# Altium schematic symbol library Robert_.SchLib: 177 symbols (part 1 of 6)
Pins are listed as number, name and electrical type; pins without a type are passive.

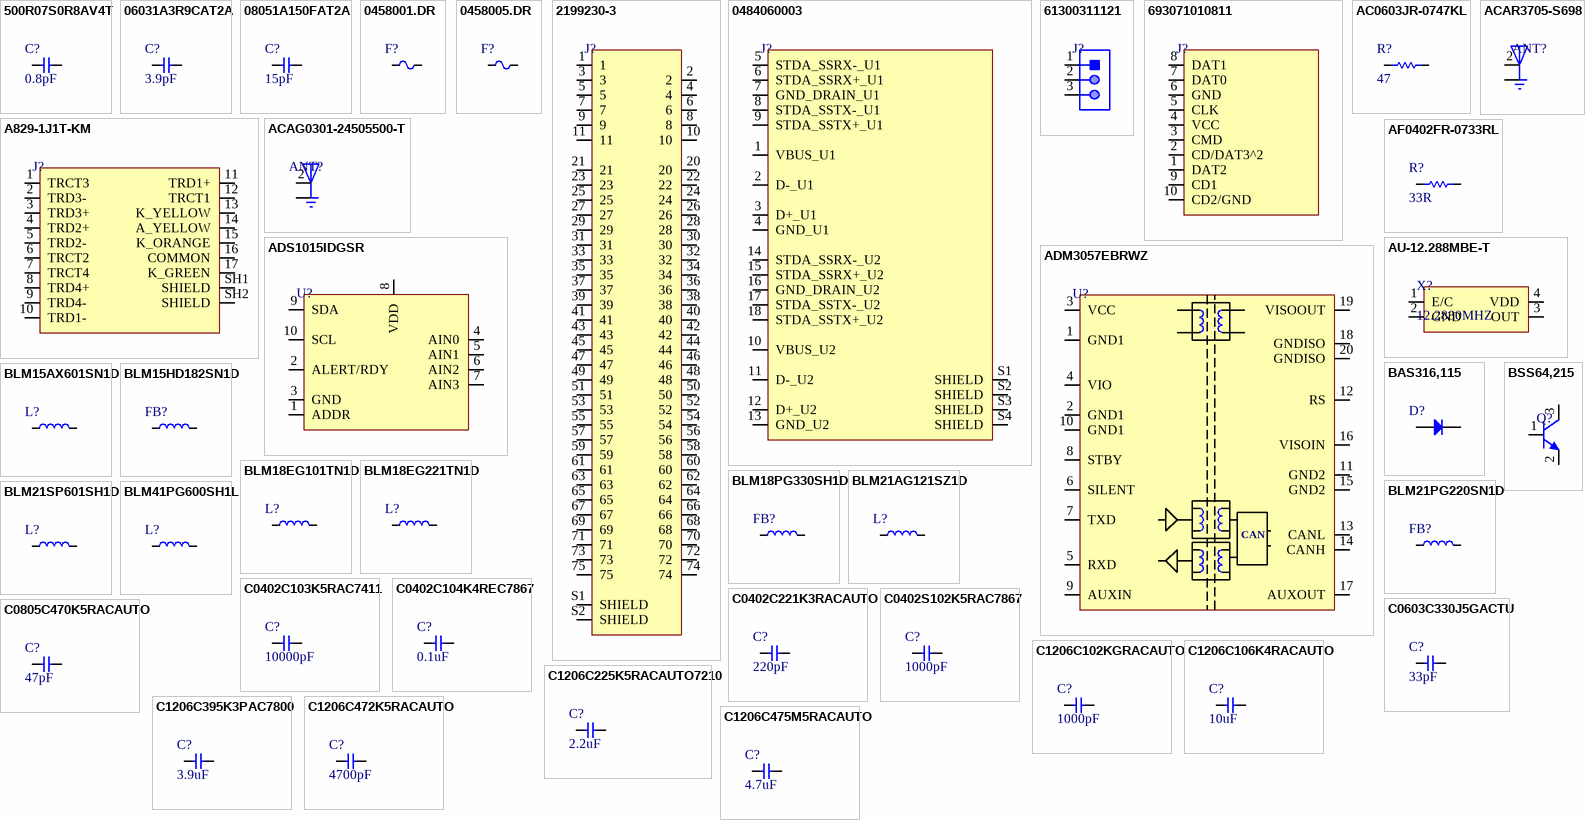
[diagram p0: symbols 500R07S0R8AV4T to C1206C475M5RACAUTO]

## 500R07S0R8AV4T
designator C?, comment 0.8pF
CAP CER 0.8PF 50V C0G/NP0 0402; Manufacturer: Johanson; Manufacturer Part Number: 500R07S0R8AV4T; Item Type: Capacitor; Supplier: Arrow Electronics; Supplier Part Number: 500R07S0R8AV4T; RoHS: Yes; Category: Ceramic Capacitors; Stock: 20000; Pricing: 10000=0.04, 20000=0.0378, 30000=0.0368, 50000=0.0346, 100000=0.0307 (USD); ComponentLink1URL: https://datasheet.ciiva.com/8062/1698397-8062124.pdf?src-supplier=Element14; ComponentLink1Description: https://datasheet.ciiva.com/8062/1698397-8062124.pdf?src-supplier=Element14; ComponentLink2URL: https://datasheet.ciiva.com/46385/1698397-46385194.pdf?src-supplier=Element14; ComponentLink2Description: https://datasheet.ciiva.com/46385/1698397-46385194.pdf?src-supplier=Element14; ComponentLink3URL: https://datasheet.ciiva.com/24039/jti-cat-mlcc-highq-516212-24039375.pdf?src-supplier=Mouser; ComponentLink3Description: https://datasheet.ciiva.com/24039/jti-cat-mlcc-highq-516212-24039375.pdf?src-supplier=Mouser; ComponentLink4URL: https://datasheet.ciiva.com/1461/1318610-1461654.pdf?src-supplier=Element14; ComponentLink4Description: https://datasheet.ciiva.com/1461/1318610-1461654.pdf?src-supplier=Element14
footprint Cap-0402
pins: 1, 2

## 06031A3R9CAT2A
designator C?, comment 3.9pF
CAP CER 3.9PF 100V C0G/NP0 0603; Manufacturer: Kyocera AVX; Manufacturer Part Number: 06031A3R9CAT2A; Item Type: Capacitor; Supplier: Avnet; Supplier Part Number: 06031A3R9CAT2A; RoHS: Yes; Category: Ceramic Capacitors; Stock: 8000; Pricing: 8000=0.0348, 16000=0.034, 24000=0.0332, 40000=0.0324, 80000=0.0316, 400000=0.0308, 800000=0.0304 (USD); ComponentLink1URL: https://datasheet.ciiva.com/26859/getdatasheetpartid-156873-26859834.pdf?src-supplier=Verical; ComponentLink1Description: https://datasheet.ciiva.com/26859/getdatasheetpartid-156873-26859834.pdf?src-supplier=Verical; ComponentLink2URL: https://datasheet.ciiva.com/151/ccog-151266.pdf?src-supplier=Digi-Key; ComponentLink2Description: https://datasheet.ciiva.com/151/ccog-151266.pdf?src-supplier=Digi-Key; ComponentLink3URL: https://datasheet.ciiva.com/151/ccog-151267.pdf?src-supplier=Digi-Key; ComponentLink3Description: https://datasheet.ciiva.com/151/ccog-151267.pdf?src-supplier=Digi-Key; ComponentLink4URL: https://datasheet.ciiva.com/151/ccog-151268.pdf?src-supplier=Digi-Key; ComponentLink4Description: https://datasheet.ciiva.com/151/ccog-151268.pdf?src-supplier=Digi-Key
footprint Cap-0603
pins: 1, 2

## 08051A150FAT2A
designator C?, comment 15pF
CAP CER 15PF 100V NP0 0805; Manufacturer: Kyocera AVX; Manufacturer Part Number: 08051A150FAT2A; Item Type: Capacitor; Supplier: Avnet; Supplier Part Number: 96Y8394; RoHS: Yes; Category: Ceramic Capacitors; Stock: 3533; Pricing: 1=0.551, 25=0.294, 50=0.242 (USD); ComponentLink1URL: https://datasheet.ciiva.com/6265/ccog-6265518.pdf?src-supplier=Digi-Key; ComponentLink1Description: https://datasheet.ciiva.com/6265/ccog-6265518.pdf?src-supplier=Digi-Key; ComponentLink2URL: https://datasheet.ciiva.com/5414/ccog-5414908.pdf?src-supplier=Mouser; ComponentLink2Description: https://datasheet.ciiva.com/5414/ccog-5414908.pdf?src-supplier=Mouser
footprint Cap-0805 (SMD 0805)
pins: 1, 2

## 0458001.DR
designator F?
FUSE BRD MNT 1A 48VAC 75VDC 1206; Manufacturer: Littelfuse; Manufacturer Part Number: 0458001.DR; Supplier: Rs; Supplier Part Number: 1740295; RoHS: Yes; Category: Fuses; Stock: 140; Pricing: 1=0.76003, 10=0.73892, 25=0.71895, 50=0.70003 (GBP); ComponentLink1URL: https://datasheet.ciiva.com/299/littelfuse-fuse-458-series-299789.pdf?src-supplier=Digi-Key; ComponentLink1Description: https://datasheet.ciiva.com/299/littelfuse-fuse-458-series-299789.pdf?src-supplier=Digi-Key; ComponentLink2URL: https://datasheet.ciiva.com/299/littelfuse-fuse-458-series-299790.pdf?src-supplier=Digi-Key; ComponentLink2Description: https://datasheet.ciiva.com/299/littelfuse-fuse-458-series-299790.pdf?src-supplier=Digi-Key; ComponentLink3URL: https://datasheet.ciiva.com/299/littelfuse-fuse-458-series-299791.pdf?src-supplier=Digi-Key; ComponentLink3Description: https://datasheet.ciiva.com/299/littelfuse-fuse-458-series-299791.pdf?src-supplier=Digi-Key; ComponentLink4URL: https://datasheet.ciiva.com/1730/337915-1730543.pdf?src-supplier=Newark; ComponentLink4Description: https://datasheet.ciiva.com/1730/337915-1730543.pdf?src-supplier=Newark; ComponentLink5URL: https://datasheet.ciiva.com/7991/337915-7991902.pdf?src-supplier=Element14; ComponentLink5Description: https://datasheet.ciiva.com/7991/337915-7991902.pdf?src-supplier=Element14; ComponentLink6URL: https://datasheet.ciiva.com/1549/337915-1549634.pdf?src-supplier=Element14; ComponentLink6Description: https://datasheet.ciiva.com/1549/337915-1549634.pdf?src-supplier=Element14; Item Type: Fuse
footprint 0458001.DR
pins: 1, 2

## 0458005.DR
designator F?
Fuse Chip Fast Acting 5A 75V SMD Solder Pad 1206 Ceramic T/R Automotive cULus; Manufacturer: Littelfuse; Manufacturer Part Number: 0458005.DR; Supplier: Rs; Supplier Part Number: 1740294; RoHS: Yes; Category: Fuses; Stock: 1005; Pricing: 1=0.62077, 10=0.73892, 25=0.71895, 50=0.70003 (GBP); ComponentLink1URL: https://datasheet.ciiva.com/1730/337915-1730547.pdf?src-supplier=Newark; ComponentLink1Description: https://datasheet.ciiva.com/1730/337915-1730547.pdf?src-supplier=Newark; ComponentLink2URL: https://datasheet.ciiva.com/7991/337915-7991910.pdf?src-supplier=Element14; ComponentLink2Description: https://datasheet.ciiva.com/7991/337915-7991910.pdf?src-supplier=Element14; ComponentLink3URL: https://datasheet.ciiva.com/299/littelfuse-fuse-458-series-299786.pdf?src-supplier=Digi-Key; ComponentLink3Description: https://datasheet.ciiva.com/299/littelfuse-fuse-458-series-299786.pdf?src-supplier=Digi-Key; ComponentLink4URL: https://datasheet.ciiva.com/299/littelfuse-fuse-458-series-299787.pdf?src-supplier=Digi-Key; ComponentLink4Description: https://datasheet.ciiva.com/299/littelfuse-fuse-458-series-299787.pdf?src-supplier=Digi-Key; ComponentLink5URL: https://datasheet.ciiva.com/299/littelfuse-fuse-458-series-299788.pdf?src-supplier=Digi-Key; ComponentLink5Description: https://datasheet.ciiva.com/299/littelfuse-fuse-458-series-299788.pdf?src-supplier=Digi-Key
footprint 0458005.DR
pins: 1, 2

## 2199230-3
designator J?
M2 KEY B Connector .5PITCH 4.2H KEY B EMBOSS NGFF MINICARD; Manufacturer: TE Connectivity; Manufacturer Part Number: 2199230-3; Gender: Female; Number of Positions: 67; PCB Mounting Orientation: Right Angle; Contact Current Rating: 500mA; Voltage Rating: 50V; Insulation Resistance: 500MR; Pitch: 0.5mm; Row Spacing: 7.55mm; Supplier: Rs; Supplier Part Number: 2175444; RoHS: Yes; Category: Card Edge Connectors; Stock: 5895; Pricing: 1000=0.84 (GBP); Mounting Technology: Surface Mount; Contact Plating: Gold,Matte; Contact Material: Copper Alloy; Color: Black; Housing Color: Black; Insulation Material: Thermoplastic; Housing Material: Thermoplastic; Min Operating Temperature: -40°C; Max Operating Temperature: 80°C; Number of Rows: 2; Packaging: Tape and Reel; Package Quantity: 1000; Termination: Solder; Series: -; Contact Type: -; Current Rating: 500mA; Number of Contacts: 67; Orientation: Right Angle; Max Voltage Rating (AC): 50V; Length: 0.862inch; Width: 8.7mm; Height: 0.165inch; Radiation Hardening: No; ELV: Compliant; RoHS Compliant: Yes; Reach SVHC Compliant: Unknown
footprint 2199230-3
pins: 1, 2, 3, 4, 5, 6, 7, 8, 9, 10, 11, 20, 21, 22, 23, 24, 25, 26, 27, 28, 29, 30, 31, 32, 33, 34, 35, 36, 37, 38, 39, 40, 41, 42, 43, 44, 45, 46, 47, 48, 49, 50, 51, 52, 53, 54, 55, 56, 57, 58, 59, 60, 61, 62, 63, 64, 65, 66, 67, 68, 69, 70, 71, 72, 73, 74, 75, S1 SHIELD, S2 SHIELD

## 0484060003
designator J?
CONN RCPT USB3.0 TYPEA STACK R/A; Manufacturer: Molex; Manufacturer Part Number: 0484060003; Supplier: Mouser; Supplier Part Number: 538-48406-0003; RoHS: Yes; Stock: 6983; Pricing: 1=2.63, 10=2.32, 50=2.32, 100=1.84, 1000=1.79, 10000=1.36 (USD); ComponentLink1URL: https://datasheet.octopart.com/48406-0003-Molex-datasheet-101583044.pdf?src-supplier=Farnell; ComponentLink1Description: https://datasheet.octopart.com/48406-0003-Molex-datasheet-101583044.pdf?src-supplier=Farnell; ComponentLink2URL: https://www.molex.com/pdm_docs/sd/484060003_sd.pdf?src-supplier=Digi-Key; ComponentLink2Description: https://www.molex.com/pdm_docs/sd/484060003_sd.pdf?src-supplier=Digi-Key; ComponentLink3URL: https://datasheet.octopart.com/48406-0003-Molex-datasheet-33003502.pdf?src-supplier=Newark; ComponentLink3Description: https://datasheet.octopart.com/48406-0003-Molex-datasheet-33003502.pdf?src-supplier=Newark; ComponentLink4URL: https://datasheet.octopart.com/48406-0003-Molex-datasheet-21137617.pdf?src-supplier=Sager+Electronics; ComponentLink4Description: https://datasheet.octopart.com/48406-0003-Molex-datasheet-21137617.pdf?src-supplier=Sager+Electronics; ComponentLink5URL: https://datasheet.octopart.com/484060003-Molex-datasheet-168216735.pdf?src-supplier=TME; ComponentLink5Description: https://datasheet.octopart.com/484060003-Molex-datasheet-168216735.pdf?src-supplier=TME; ComponentLink6URL: https://datasheet.octopart.com/48406-0003-Molex-datasheet-154752298.pdf?src-supplier=Master+Electronics; ComponentLink6Description: https://datasheet.octopart.com/48406-0003-Molex-datasheet-154752298.pdf?src-supplier=Master+Electronics
footprint 0484060003
pins: 1 VBUS_U1, 2 D-_U1, 3 D+_U1, 4 GND_U1, 5 STDA_SSRX-_U1, 6 STDA_SSRX+_U1, 7 GND_DRAIN_U1, 8 STDA_SSTX-_U1, 9 STDA_SSTX+_U1, 10 VBUS_U2, 11 D-_U2, 12 D+_U2, 13 GND_U2, 14 STDA_SSRX-_U2, 15 STDA_SSRX+_U2, 16 GND_DRAIN_U2, 17 STDA_SSTX-_U2, 18 STDA_SSTX+_U2, S1 SHIELD, S2 SHIELD, S3 SHIELD, S4 SHIELD

## 61300311121
designator J?
CONN HEADER VERT 3POS 2.54MM; Manufacturer: Wurth Electronics; Manufacturer Part Number: 61300311121; Number of Positions: 3; Gender: Male; Connector Type: Male Pin; Pitch: 0.1inch; Item Type: Male Header; Supplier 1: Digi-Key; Stock 1: 81286; Pricing 1: 1=0.13, 10=0.106, 25=0.088, 50=0.074, 100=0.067, 1000=0.061 (USD); Mount: Through Hole; Contact Plating: Gold; Contact Material: Copper; Color: Black; Number of Rows: 1; Packaging: Bulk; Termination: Solder; Number of Contacts: 3; Contact Mating Length: 0.236inch; REACH SVHC: Unknown; Lead Free: Lead Free; ComponentLink1URL: http://www.farnell.com/cad/1737268.pdf?src-supplier=Element14; ComponentLink1Description: http://www.farnell.com/cad/1737268.pdf?src-supplier=Element14; ComponentLink2URL: https://katalog.we-online.de/em/datasheet/6130xx11121.pdf?src-supplier=Digi-Key; ComponentLink2Description: https://katalog.we-online.de/em/datasheet/6130xx11121.pdf?src-supplier=Digi-Key; Supplier Part Number 1: 732-5316-ND
footprint HDR1X3_ (Connector; Header; 3 Position)
pins: 1, 2, 3

## 693071010811
designator J?
CONN MICRO SD CARD PUSH-PUSH R/A; Manufacturer: Wurth Electronics; Manufacturer Part Number: 693071010811; Number of Contacts: 8; Supplier: Rs; Supplier Part Number: 7636808P; RoHS: Yes; Category: Memory Connectors; Stock: 1582; Pricing: 15=2.41, 50=2.12, 100=2.02, 250=1.74 (GBP); Mounting Technology: Surface Mount; Contact Material: Copper Alloy,Copper,Gold; Contact Plating: Gold; Min Operating Temperature: -25°C; Max Operating Temperature: 85°C; Package Quantity: 1; Packaging: Cut Tape; Series: -; Length: 14mm; Width: 15.2mm; Height: 1.98mm; RoHS Compliant: Yes; Reach SVHC Compliant: Unknown; Lead Free: Lead Free; ComponentLink1URL: https://datasheet.ciiva.com/6935/693071010811-6935152.pdf?src-supplier=Digi-Key; ComponentLink1Description: https://datasheet.ciiva.com/6935/693071010811-6935152.pdf?src-supplier=Digi-Key; ComponentLink2URL: https://datasheet.ciiva.com/25605/0900766b81113f2e-25605369.pdf?src-supplier=Rs; ComponentLink2Description: https://datasheet.ciiva.com/25605/0900766b81113f2e-25605369.pdf?src-supplier=Rs; ComponentLink3URL: https://datasheet.ciiva.com/1104/1759178-1104796.pdf?src-supplier=Element14; ComponentLink3Description: https://datasheet.ciiva.com/1104/1759178-1104796.pdf?src-supplier=Element14; ComponentLink4URL: https://datasheet.ciiva.com/6935/693071010811-6935146.pdf?src-supplier=Digi-Key; ComponentLink4Description: https://datasheet.ciiva.com/6935/693071010811-6935146.pdf?src-supplier=Digi-Key
footprint 693071010811
pins: 1 DAT2, 2 CD/DAT3^2, 3 CMD, 4 VCC, 5 CLK, 6 GND, 7 DAT0, 8 DAT1, 9 CD1, 10 CD2/GND

## A829-1J1T-KM
designator J?
CONN JACK 1PORT 1000 BASE-TX PCB; Manufacturer: Bel; Manufacturer Part Number: A829-1J1T-KM; Supplier: Mouser; Supplier Part Number: 530-A829-1J1T-KM; RoHS: Yes; Category: Modular / Ethernet Connectors; Stock: 1152; Pricing: 1=7.48, 10=6.77, 50=6.4, 100=6.4, 1000=4.99, 10000=4.99 (USD); ComponentLink1URL: https://belfuse.com/resources/drawings/magneticsolutions/dr-mag-a829-1j1t-km.pdf?src-supplier=Digi-Key; ComponentLink1Description: https://belfuse.com/resources/drawings/magneticsolutions/dr-mag-a829-1j1t-km.pdf?src-supplier=Digi-Key; ComponentLink2URL: https://datasheet.octopart.com/A829-1J1T-KM-Bel-Fuse-datasheet-154547170.pdf?src-supplier=Electro+Sonic; ComponentLink2Description: https://datasheet.octopart.com/A829-1J1T-KM-Bel-Fuse-datasheet-154547170.pdf?src-supplier=Electro+Sonic
footprint A829-1J1T-KM
pins: 1 TRCT3, 2 TRD3-, 3 TRD3+, 4 TRD2+, 5 TRD2-, 6 TRCT2, 7 TRCT4, 8 TRD4+, 9 TRD4-, 10 TRD1-, 11 TRD1+, 12 TRCT1, 13 K_YELLOW, 14 A_YELLOW, 15 K_ORANGE, 16 COMMON, 17 K_GREEN, SH1 SHIELD, SH2 SHIELD

## AC0603JR-0747KL
designator R?, comment 47
RES SMD 47K OHM 5% 1/10W 0603; Manufacturer: Yageo; Manufacturer Part Number: AC0603JR-0747KL; Power Rating: 100mW; Value: 47kR; Voltage Rating: 50V; Temperature Coefficient: 100ppm/°C; Supplier: Future Electronics; Supplier Part Number: 1055988; RoHS: Yes; Category: Chip SMD Resistors; Stock: 65000; Pricing: 5000=0.0016, 75000=0.0015, 200000=0.0015, 750000=0.0014, 2000000=0.0013 (USD); Case/Package: 0603; Case Code (Imperial): 0603; Case Code (Metric): 1608; Min Operating Temperature: -55°C; Max Operating Temperature: 155°C; Packaging: Tape and Reel; Tolerance: 5%; Number of Terminations: 2; Termination: SMD/SMT; Max Power Dissipation: 100mW; Features: Moisture Resistant,Automotive AEC-Q200; Series: AC; Length: 1.6mm; Width: 0.8mm; Height: 0.45mm; Ratings: AEC-Q200; RoHS Compliant: Yes; ComponentLink1URL: http://www.mouser.com/ds/2/447/yageodocoutput-1111992.pdf?src-supplier=Mouser; ComponentLink1Description: http://www.mouser.com/ds/2/447/yageodocoutput-1111992.pdf?src-supplier=Mouser; ComponentLink2URL: https://datasheet.octopart.com/AC0603JR-0747KL-Yageo-datasheet-166720450.pdf?src-supplier=Future+Electronics; ComponentLink2Description: https://datasheet.octopart.com/AC0603JR-0747KL-Yageo-datasheet-166720450.pdf?src-supplier=Future+Electronics
footprint Res-0603
pins: 1, 2

## ACAG0301-24505500-T
designator ANT?
RF ANT 2.4GHZ/5.5GHZ CHIP SLD; Manufacturer: Abracon; Manufacturer Part Number: ACAG0301-24505500-T; Supplier: Future Electronics; Supplier Part Number: 4120257; RoHS: Yes; Category: RF Antennas; Stock: 10; Pricing: 1=1.17, 15=1.05, 75=0.985, 300=0.925, 1500=0.86 (USD); ComponentLink1URL: https://abracon.com/datasheets/ACAG0301-24505500-T.pdf?src-supplier=Digi-Key; ComponentLink1Description: https://abracon.com/datasheets/ACAG0301-24505500-T.pdf?src-supplier=Digi-Key; ComponentLink2URL: https://datasheet.octopart.com/ACAG0301-24505500-T-Abracon-datasheet-137316205.pdf?src-supplier=Sager+Electronics; ComponentLink2Description: https://datasheet.octopart.com/ACAG0301-24505500-T-Abracon-datasheet-137316205.pdf?src-supplier=Sager+Electronics
footprint ACAG0301-24505500-T
pins: 1 GND (power), 2 INPUT, 3 GND (power)

## ACAR3705-S698
designator ANT?
Antenna Chip -1.13dB Gain 960MHz/2170MHz/2700MHz 5-Pin Chip T/R; Manufacturer: Abracon; Manufacturer Part Number: ACAR3705-S698; Number of Bands: 3; Return Loss: -13.87dB; Supplier: Rs; Supplier Part Number: 2505128P; RoHS: Yes; Category: RF Antennas; Stock: 1350; Pricing: 50=3.185, 100=2.88, 250=2.45, 500=2.35 (GBP); Mounting Technology: Surface Mount; Packaging: Tape and Reel; Termination: Solder; ComponentLink1URL: https://abracon.com/datasheets/ACAR3705-S698.pdf?src-supplier=Digi-Key; ComponentLink1Description: https://abracon.com/datasheets/ACAR3705-S698.pdf?src-supplier=Digi-Key
footprint ACAR3705-S698
pins: 1 GND (power), 2 INPUT, 3 GND (power)

## ADM3057EBRWZ
designator U?
IC TXRX/ISO 1/1 20SOIC; Manufacturer: Analog Devices; Manufacturer Part Number: ADM3057EBRWZ; Supplier: Mouser; Supplier Part Number: 584-ADM3057EBRWZ; RoHS: Yes; Category: Interface ICs; Stock: 9176; Pricing: 1=13.72, 10=12.62, 50=12.09, 100=12.09, 1000=9.47, 10000=9.47 (USD); Series: *; RoHS Compliant: Yes; ComponentLink1URL: https://www.analog.com/media/en/technical-documentation/data-sheets/ADM3055E-3057E.pdf?src-supplier=Digi-Key; ComponentLink1Description: https://www.analog.com/media/en/technical-documentation/data-sheets/ADM3055E-3057E.pdf?src-supplier=Digi-Key
footprint 20-SOIC
pins: 1 GND1, 2 GND1, 3 VCC, 4 VIO, 5 RXD, 6 SILENT, 7 TXD, 8 STBY, 9 AUXIN, 10 GND1, 11 GND2, 12 RS, 13 CANL, 14 CANH, 15 GND2, 16 VISOIN, 17 AUXOUT, 18 GNDISO, 19 VISOOUT, 20 GNDISO
text: CAN

## ADS1015IDGSR
designator U?
IC ADC 12BIT SIGMA-DELTA 10VSSOP; Manufacturer: Texas Instruments; Manufacturer Part Number: ADS1015IDGSR; Operating Supply Voltage: 3.3V; Min Supply Voltage: 2V; Max Supply Voltage: 5.5V; Interface: I2C; Number of Converters: 1; Resolution: 12b; Number of Bits: 12; Sampling Rate: 3.3KS/s; Polarity: Bipolar; Integral Nonlinearity (INL): 0.5LSB; Supply Type: Single; Number of Inputs: 4; Power Dissipation: 900uW; Supplier 1: Digi-Key; RoHS: Yes; Category: Analog to Digital Converters (ADCs); Pricing 1: 1=3.09000, 10=2.77500, 25=2.62360, 100=2.27370, 250=2.15712, 500=1.93556, 1000=1.65000 (USD); Case/Package: VSSOP; Number of Pins: 10; Contact Plating: Gold; Min Operating Temperature: -40°C; Max Operating Temperature: 125°C; Packaging: Tape and Reel; Package Quantity: 2500; Number of A/D Converters: 1; Number of Elements: 1; Conversion Rate: 3.3KS/s; Max Supply Voltage (DC): 5.5V; Min Supply Voltage (DC): 2V; Series: -; Radiation Hardening: No; Reach SVHC Compliant: Yes; Lead Free: Lead Free; RoHS Compliant: Yes; ComponentLink1URL: https://datasheet.ciiva.com/14260/sbas473c-14260076.pdf?src-supplier=Avnet; ComponentLink1Description: https://datasheet.ciiva.com/14260/sbas473c-14260076.pdf?src-supplier=Avnet; ComponentLink2URL: https://datasheet.ciiva.com/6662/ads1013-6662716.pdf?src-supplier=Digi-Key; ComponentLink2Description: https://datasheet.ciiva.com/6662/ads1013-6662716.pdf?src-supplier=Digi-Key; Supplier Part Number 1: 296-41185-1-ND; LCSC Part Number: C193969; Item Type: IC
footprint 10-VSSOP
pins: 1 ADDR, 2 ALERT/RDY, 3 GND, 4 AIN0, 5 AIN1, 6 AIN2, 7 AIN3, 8 VDD, 9 SDA, 10 SCL

## AF0402FR-0733RL
designator R?, comment 33R
RES SMD 33 OHM 1% 1/16W 0402; Manufacturer: Yageo; Manufacturer Part Number: AF0402FR-0733RL; Voltage Rating: 50V; Supplier: Future Electronics; Supplier Part Number: 2101591; RoHS: Yes; Category: Chip SMD Resistors; Stock: 20000; Pricing: 10000=0.0024, 50000=0.0022, 200000=0.0021, 500000=0.002, 1250000=0.0019 (USD); ComponentLink1URL: http://www.yageo.com/documents/recent/PYu-AF_51_RoHS_L_5.pdf?src-supplier=Digi-Key; ComponentLink1Description: http://www.yageo.com/documents/recent/PYu-AF_51_RoHS_L_5.pdf?src-supplier=Digi-Key; ComponentLink2URL: https://datasheet.octopart.com/AF0402FR-0733RL-Yageo-datasheet-164730775.pdf?src-supplier=Future+Electronics; ComponentLink2Description: https://datasheet.octopart.com/AF0402FR-0733RL-Yageo-datasheet-164730775.pdf?src-supplier=Future+Electronics
footprint Res-0402
pins: 1, 2

## AU-12.288MBE-T
designator X?, comment 12.2880MHZ
XTAL OSC XO 12.2880MHZ CMOS SMD; Manufacturer: TXC; Manufacturer Part Number: AU-12.288MBE-T; Supplier: Digi-Key; Supplier Part Number: 887-1638-1-ND; RoHS: Yes; Category: Oscillators; Stock: 11857; Pricing: 1=2.17, 10=2.121, 50=2.02, 100=1.7675, 500=1.717, 1000=1.4645 (USD); ComponentLink1URL: https://datasheet.ciiva.com/6724/au-6724587.pdf?src-supplier=Digi-Key; ComponentLink1Description: https://datasheet.ciiva.com/6724/au-6724587.pdf?src-supplier=Digi-Key; ComponentLink2URL: https://datasheet.ciiva.com/6724/au-6724589.pdf?src-supplier=Digi-Key; ComponentLink2Description: https://datasheet.ciiva.com/6724/au-6724589.pdf?src-supplier=Digi-Key; ComponentLink3URL: https://datasheet.ciiva.com/6724/au-6724590.pdf?src-supplier=Digi-Key; ComponentLink3Description: https://datasheet.ciiva.com/6724/au-6724590.pdf?src-supplier=Digi-Key
footprint AU-12.288MBE-T
pins: 1 E/C, 2 GND, 3 OUT, 4 VDD

## BAS316,115
designator D?
Rectifier Diode Switching 100V 0.25A 4ns Automotive 2-Pin SOD-323 T/R; Manufacturer: Nexperia; Manufacturer Part Number: BAS316,115; Forward Current: 250mA; Max Forward Surge Current (Ifsm): 500mA; Value: 1.5pF; Max Reverse Current: 500nA; Supplier: Rs; Supplier Part Number: 1821844P; RoHS: Yes; Category: Rectifier Diodes; Stock: 258600; Pricing: 600=0.062, 1200=0.039, 1800=0.037, 2400=0.035 (GBP); Pins: 2NUMBER; Max Operating Temperature: 150°C; Max Repetitive Reverse Voltage (Vrrm): 100V; Packaging: 10Packaging; Reverse Voltage: 100V; Height: 1.1mm; RoHS Compliant: Yes; ComponentLink1URL: http://www.farnell.com/datasheets/1856332.pdf?src-supplier=Farnell; ComponentLink1Description: http://www.farnell.com/datasheets/1856332.pdf?src-supplier=Farnell; ComponentLink2URL: https://assets.nexperia.com/documents/data-sheet/BAS16_SER.pdf?src-supplier=Digi-Key; ComponentLink2Description: https://assets.nexperia.com/documents/data-sheet/BAS16_SER.pdf?src-supplier=Digi-Key; ComponentLink3URL: https://datasheet.octopart.com/BAS316%2C115-Nexperia-datasheet-77871323.pdf?src-supplier=Future+Electronics; ComponentLink3Description: https://datasheet.octopart.com/BAS316%2C115-Nexperia-datasheet-77871323.pdf?src-supplier=Future+Electronics; ComponentLink4URL: https://datasheet.octopart.com/BAS316%2C115-Nexperia-datasheet-32749520.pdf?src-supplier=Element14; ComponentLink4Description: https://datasheet.octopart.com/BAS316%2C115-Nexperia-datasheet-32749520.pdf?src-supplier=Element14; ComponentLink5URL: http://www.farnell.com/datasheets/1856332.pdf?src-supplier=Newark; ComponentLink5Description: http://www.farnell.com/datasheets/1856332.pdf?src-supplier=Newark; ComponentLink6URL: https://datasheet.octopart.com/BAS316%2C115-NXP-datasheet-5319124.pdf?src-supplier=TME; ComponentLink6Description: https://datasheet.octopart.com/BAS316%2C115-NXP-datasheet-5319124.pdf?src-supplier=TME
footprint SOD-323
pins: 1 K, 2 A

## BLM15AX601SN1D
designator L?
FERRITE BEAD 600 OHM 0402 1LN; Manufacturer: Murata; Manufacturer Part Number: BLM15AX601SN1D; Material: Steel,Ferrite; Tolerance: 25%; Impedance: 600R; Current Rating: 500mA; Number of Lines: 1; DC Resistance (DCR): 340mR; Test Frequency: 100MHz; Supplier: Rs; Supplier Part Number: 8390786P; RoHS: Yes; Category: Ferrite Beads and Chips; Stock: 31900; Pricing: 1000=0.019, 2000=0.016, 5000=0.014, 10000=0.013 (GBP); Case/Package: 0402; Pins: 2; Case Code (Metric): 1005; Case Code (Imperial): 0402; Core Material: Ferrite; Min Operating Temperature: -55°C; Max Operating Temperature: 125°C; Package Quantity: 1; Packaging: Tape and Reel; Max Current Rating: 500mA; Termination: SMD/SMT; Max DC Current: 500mA; Number of Circuits: 1; Series: BLM15AX_SN; DC Resistance-Max: 340mR; RMS Current (Irms): 500mA; ESR: 340mR; Length: 1mm; Width: 0.5mm; Height: 0.5mm; Depth: 0.5mm; Reach SVHC Compliant: No; Lead Free: Lead Free; RoHS Compliant: Yes; ComponentLink1URL: https://datasheet.ciiva.com/1012/l0110s0100blm15ax-sn-1012320.pdf?src-supplier=Digi-Key; ComponentLink1Description: https://datasheet.ciiva.com/1012/l0110s0100blm15ax-sn-1012320.pdf?src-supplier=Digi-Key; ComponentLink2URL: https://datasheet.ciiva.com/41425/001171675-da-01-en-chip-drossel0402-600r-420ma-1-0x0-5mm-41425713.pdf?src-supplier=Conrad; ComponentLink2Description: https://datasheet.ciiva.com/41425/001171675-da-01-en-chip-drossel0402-600r-420ma-1-0x0-5mm-41425713.pdf?src-supplier=Conrad; ComponentLink3URL: https://datasheet.ciiva.com/41449/001172169-da-01-en-drossel-0402-600r-1-0x0-5mm-10000st-41449458.pdf?src-supplier=Conrad; ComponentLink3Description: https://datasheet.ciiva.com/41449/001172169-da-01-en-drossel-0402-600r-1-0x0-5mm-10000st-41449458.pdf?src-supplier=Conrad; ComponentLink4URL: https://datasheet.ciiva.com/1012/l0110e-1012321.pdf?src-supplier=Digi-Key; ComponentLink4Description: https://datasheet.ciiva.com/1012/l0110e-1012321.pdf?src-supplier=Digi-Key; ComponentLink5URL: https://datasheet.ciiva.com/1012/l0110e-1012322.pdf?src-supplier=Digi-Key; ComponentLink5Description: https://datasheet.ciiva.com/1012/l0110e-1012322.pdf?src-supplier=Digi-Key; ComponentLink6URL: https://datasheet.ciiva.com/16420/l0110s0100blm15ax-sn-16420781.pdf?src-supplier=Future+Electronics; ComponentLink6Description: https://datasheet.ciiva.com/16420/l0110s0100blm15ax-sn-16420781.pdf?src-supplier=Future+Electronics
footprint IND-0402
pins: 1, 2

## BLM15HD182SN1D
designator FB?
FERRITE BEAD 1.8K OHM 0402 1LN; Manufacturer: Murata; Manufacturer Part Number: BLM15HD182SN1D; Material: Ferrite,Steel; Tolerance: 25%; Impedance: 1.8kR; DC Resistance (DCR): 2.2R; Max DC Current: 200mA; Number of Lines: 1; Test Frequency: 100MHz; Supplier: Rs; Supplier Part Number: 7926224P; RoHS: Yes; Category: Ferrite Beads and Chips; Stock: 3975; Pricing: 500=0.057, 1000=0.05, 2500=0.044, 5000=0.04 (GBP); Case/Package: 0402; Pins: 2; Core Material: Ferrite; Case Code (Metric): 1005; Case Code (Imperial): 0402; Min Operating Temperature: -55°C; Max Operating Temperature: 125°C; Package Quantity: 1; Packaging: Tape and Reel; Current Rating: 200mA; Max Current Rating: 200mA; Termination: SMD/SMT; DC Current: 200mA; Number of Circuits: 1; Series: BLM15H; DC Resistance-Max: 2.2R; Length: 1mm; Width: 0.5mm; Height: 0.5mm; Depth: 0.5mm; Radiation Hardening: No; Reach SVHC Compliant: No; Military Standard: Not; Lead Free: Lead Free; RoHS Compliant: Yes; ComponentLink1URL: https://datasheet.ciiva.com/11799/0900766b811b5866-11799012.pdf?src-supplier=Rs; ComponentLink1Description: https://datasheet.ciiva.com/11799/0900766b811b5866-11799012.pdf?src-supplier=Rs; ComponentLink2URL: https://datasheet.ciiva.com/1466/5168-1466912.pdf?src-supplier=Element14; ComponentLink2Description: https://datasheet.ciiva.com/1466/5168-1466912.pdf?src-supplier=Element14; ComponentLink3URL: https://datasheet.ciiva.com/18089/getdatasheetpartid-153054-18089628.pdf?src-supplier=Verical; ComponentLink3Description: https://datasheet.ciiva.com/18089/getdatasheetpartid-153054-18089628.pdf?src-supplier=Verical; ComponentLink4URL: https://datasheet.ciiva.com/41425/001171684-da-01-en-chip-drossel0402-1800r-200ma-1-0x0-5mm-41425786.pdf?src-supplier=Conrad; ComponentLink4Description: https://datasheet.ciiva.com/41425/001171684-da-01-en-chip-drossel0402-1800r-200ma-1-0x0-5mm-41425786.pdf?src-supplier=Conrad; ComponentLink5URL: https://datasheet.ciiva.com/41449/001172201-da-01-en-drossel-0402-1800r-1-0x0-5mm-10000st-41449489.pdf?src-supplier=Conrad; ComponentLink5Description: https://datasheet.ciiva.com/41449/001172201-da-01-en-drossel-0402-1800r-1-0x0-5mm-10000st-41449489.pdf?src-supplier=Conrad; ComponentLink6URL: https://datasheet.ciiva.com/1466/5168-1466911.pdf?src-supplier=Element14; ComponentLink6Description: https://datasheet.ciiva.com/1466/5168-1466911.pdf?src-supplier=Element14; ComponentLink7URL: https://datasheet.ciiva.com/6211/l0110s0101blm15h-6211478.pdf?src-supplier=Digi-Key; ComponentLink7Description: https://datasheet.ciiva.com/6211/l0110s0101blm15h-6211478.pdf?src-supplier=Digi-Key; ComponentLink8URL: https://datasheet.ciiva.com/29985/l0110s0101blm15h-29985212.pdf?src-supplier=Avnet; ComponentLink8Description: https://datasheet.ciiva.com/29985/l0110s0101blm15h-29985212.pdf?src-supplier=Avnet; ComponentLink9URL: https://datasheet.ciiva.com/16420/l0110s0101blm15h-16420767.pdf?src-supplier=Future+Electronics; ComponentLink9Description: https://datasheet.ciiva.com/16420/l0110s0101blm15h-16420767.pdf?src-supplier=Future+Electronics; ComponentLink10URL: https://datasheet.ciiva.com/3081/l0110s0101blm15h-3081606.pdf?src-supplier=Avnet; ComponentLink10Description: https://datasheet.ciiva.com/3081/l0110s0101blm15h-3081606.pdf?src-supplier=Avnet
footprint IND-0402
pins: 1, 2

## BLM18EG101TN1D
designator L?
FERRITE BEAD 100 OHM 0603 1LN; Manufacturer: Murata; Manufacturer Part Number: BLM18EG101TN1D; Material: Ferrite,Steel; Number of Lines: 1; Tolerance: 25%; Impedance: 100R; Current Rating: 2A; DC Resistance (DCR): 45mR; Test Frequency: 100MHz; Supplier: Rs; Supplier Part Number: 7926246; RoHS: Yes; Category: Ferrite Beads and Chips; Stock: 1750; Pricing: 25=0.093, 500=0.079, 1000=0.07, 2500=0.06, 5000=0.056 (GBP); Case/Package: 0603; Pins: 2; Core Material: Ferrite; Case Code (Metric): 1608; Case Code (Imperial): 0603; Min Operating Temperature: -55°C; Max Operating Temperature: 125°C; Package Quantity: 1; Packaging: Tape and Reel; Max Current Rating: 2A; Max DC Current: 2A; Termination: SMD/SMT; Number of Circuits: 1; Series: BLM18E; DC Resistance-Max: 45mR; Length: 1.6mm; Width: 0.8mm; Height: 0.8mm; Depth: 0.8mm; Reach SVHC Compliant: No; Lead Free: Lead Free; RoHS Compliant: Yes; ComponentLink1URL: https://datasheet.ciiva.com/11795/0900766b811b5866-11795406.pdf?src-supplier=Rs; ComponentLink1Description: https://datasheet.ciiva.com/11795/0900766b811b5866-11795406.pdf?src-supplier=Rs; ComponentLink2URL: https://datasheet.ciiva.com/6211/l0110s0101blm18e-6211712.pdf?src-supplier=Digi-Key; ComponentLink2Description: https://datasheet.ciiva.com/6211/l0110s0101blm18e-6211712.pdf?src-supplier=Digi-Key; ComponentLink3URL: https://datasheet.ciiva.com/41449/001171697-da-01-en-chip-drossel0603-100r-2000ma-1-6x0-8mm-41449375.pdf?src-supplier=Conrad; ComponentLink3Description: https://datasheet.ciiva.com/41449/001171697-da-01-en-chip-drossel0603-100r-2000ma-1-6x0-8mm-41449375.pdf?src-supplier=Conrad; ComponentLink4URL: https://datasheet.ciiva.com/41449/001172263-da-01-en-drossel-0603-100r-1-6x0-8mm-4000st-41449578.pdf?src-supplier=Conrad; ComponentLink4Description: https://datasheet.ciiva.com/41449/001172263-da-01-en-drossel-0603-100r-1-6x0-8mm-4000st-41449578.pdf?src-supplier=Conrad; ComponentLink5URL: https://datasheet.ciiva.com/1467/5169-1467153.pdf?src-supplier=Element14; ComponentLink5Description: https://datasheet.ciiva.com/1467/5169-1467153.pdf?src-supplier=Element14; ComponentLink6URL: https://datasheet.ciiva.com/1467/5169-1467154.pdf?src-supplier=Element14; ComponentLink6Description: https://datasheet.ciiva.com/1467/5169-1467154.pdf?src-supplier=Element14; ComponentLink7URL: https://datasheet.ciiva.com/6211/l0110s0101blm18e-6211711.pdf?src-supplier=Digi-Key; ComponentLink7Description: https://datasheet.ciiva.com/6211/l0110s0101blm18e-6211711.pdf?src-supplier=Digi-Key; ComponentLink8URL: https://datasheet.ciiva.com/6211/l0110s0101blm18e-6211709.pdf?src-supplier=Digi-Key; ComponentLink8Description: https://datasheet.ciiva.com/6211/l0110s0101blm18e-6211709.pdf?src-supplier=Digi-Key; ComponentLink9URL: https://datasheet.ciiva.com/3082/l0110s0101blm18e-3082713.pdf?src-supplier=Avnet; ComponentLink9Description: https://datasheet.ciiva.com/3082/l0110s0101blm18e-3082713.pdf?src-supplier=Avnet; ComponentLink10URL: https://datasheet.ciiva.com/16390/l0110s0101blm18e-16390603.pdf?src-supplier=Future+Electronics; ComponentLink10Description: https://datasheet.ciiva.com/16390/l0110s0101blm18e-16390603.pdf?src-supplier=Future+Electronics
footprint IND-0603 (1608 Metric) (0.063" L x 0.032" W (1.60mm x 0.80mm))
pins: 1, 2

## BLM18EG221TN1D
designator L?
FERRITE BEAD 220 OHM 0603 1LN; Manufacturer: Murata; Manufacturer Part Number: BLM18EG221TN1D; Supplier: Avnet; Supplier Part Number: BLM18EG221TN1D; RoHS: Yes; Category: Ferrite Beads and Chips; Stock: 4000; Pricing: 4000=0.07735, 8000=0.07553, 16000=0.07371, 24000=0.07189, 32000=0.07007 (USD); ComponentLink1URL: https://datasheet.ciiva.com/11795/0900766b811b5866-11795384.pdf?src-supplier=Rs; ComponentLink1Description: https://datasheet.ciiva.com/11795/0900766b811b5866-11795384.pdf?src-supplier=Rs; ComponentLink2URL: https://datasheet.ciiva.com/41449/001172266-da-01-en-drossel-0603-220r-1-6x0-8mm-4000st-41449580.pdf?src-supplier=Conrad; ComponentLink2Description: https://datasheet.ciiva.com/41449/001172266-da-01-en-drossel-0603-220r-1-6x0-8mm-4000st-41449580.pdf?src-supplier=Conrad; ComponentLink3URL: https://datasheet.ciiva.com/1467/5169-1467159.pdf?src-supplier=Element14; ComponentLink3Description: https://datasheet.ciiva.com/1467/5169-1467159.pdf?src-supplier=Element14; ComponentLink4URL: https://datasheet.ciiva.com/1467/5169-1467160.pdf?src-supplier=Element14; ComponentLink4Description: https://datasheet.ciiva.com/1467/5169-1467160.pdf?src-supplier=Element14; ComponentLink5URL: https://datasheet.ciiva.com/8510/l0110s0101blm18e-8510167.pdf?src-supplier=Avnet; ComponentLink5Description: https://datasheet.ciiva.com/8510/l0110s0101blm18e-8510167.pdf?src-supplier=Avnet; ComponentLink6URL: https://datasheet.ciiva.com/16419/l0110s0101blm18e-16419150.pdf?src-supplier=Future+Electronics; ComponentLink6Description: https://datasheet.ciiva.com/16419/l0110s0101blm18e-16419150.pdf?src-supplier=Future+Electronics; ComponentLink7URL: https://datasheet.ciiva.com/6211/l0110s0101blm18e-6211853.pdf?src-supplier=Digi-Key; ComponentLink7Description: https://datasheet.ciiva.com/6211/l0110s0101blm18e-6211853.pdf?src-supplier=Digi-Key
footprint IND-0603 (1608 Metric) (0.063" L x 0.032" W (1.60mm x 0.80mm))
pins: 1, 2

## BLM18PG330SH1D
designator FB?
Ferrite Beads Multi-Layer 33Ohm 25% 100MHz 3A 0.025Ohm DCR 0603 Automotive T/R; Manufacturer: Murata; Manufacturer Part Number: BLM18PG330SH1D; Supplier: Rs; Supplier Part Number: 1048533; RoHS: Yes; Category: Ferrite Beads and Chips; Stock: 7800; Pricing: 200=0.032, 1000=0.028, 3000=0.024, 5000=0.021, 10000=0.019 (GBP); ComponentLink1URL: https://datasheet.ciiva.com/29364/l0132s0193blm18p-29364421.pdf?src-supplier=Digi-Key; ComponentLink1Description: https://datasheet.ciiva.com/29364/l0132s0193blm18p-29364421.pdf?src-supplier=Digi-Key; ComponentLink2URL: https://datasheet.ciiva.com/29364/l0132s0193blm18p-29364423.pdf?src-supplier=Digi-Key; ComponentLink2Description: https://datasheet.ciiva.com/29364/l0132s0193blm18p-29364423.pdf?src-supplier=Digi-Key; ComponentLink3URL: https://datasheet.ciiva.com/29364/l0132s0193blm18p-29364425.pdf?src-supplier=Digi-Key; ComponentLink3Description: https://datasheet.ciiva.com/29364/l0132s0193blm18p-29364425.pdf?src-supplier=Digi-Key
footprint IND-0603 (1608 Metric) (0.063" L x 0.032" W (1.60mm x 0.80mm))
pins: 1, 2

## BLM21AG121SZ1D
designator L?
FERRITE BEAD 120 OHM 0805 1LN; Manufacturer: Murata; Manufacturer Part Number: BLM21AG121SZ1D; Core Material: 228ConductorMaterial; Max Current Rating: 800mA; Number of Lines: 1; Value: 90mR; RMS Current (Irms): 1A; Test Frequency: 100MHz; Tolerance: 25%; Supplier: Digi-Key; Supplier Part Number: 490-BLM21AG121SZ1DCT-ND; RoHS: Yes; Category: Ferrite Beads and Chips; Stock: 3900; Pricing: 1=0.19, 10=0.153, 25=0.1188, 50=0.0984, 100=0.0848, 250=0.06788, 500=0.06108, 1000=0.0509 (USD); Mounting Technology: Surface Mount; Case/Package: 0201; Min Operating Temperature: -55°C; Max Operating Temperature: 125°C; Series: EMIFIL®, BLM21; ESR: 90mR; Height: 1.05mm; Ratings: AEC-Q200; RoHS Compliant: Yes
footprint Ind-0805 (Inductor 0805)
pins: 1, 2

## BLM21PG220SN1D
designator FB?
FERRITE BEAD 22 OHM 0805 1LN; Manufacturer: Murata; Manufacturer Part Number: BLM21PG220SN1D; Supplier: Rs; Supplier Part Number: 7241539P; RoHS: Yes; Category: Ferrite Beads and Chips; Stock: 10325; Pricing: 500=0.043, 1000=0.038, 2500=0.033, 5000=0.03 (GBP); ComponentLink1URL: https://datasheet.ciiva.com/14122/anblm21p-data-e-14122211.pdf?src-supplier=Distrelec; ComponentLink1Description: https://datasheet.ciiva.com/14122/anblm21p-data-e-14122211.pdf?src-supplier=Distrelec; ComponentLink2URL: https://datasheet.ciiva.com/11799/0900766b81275e31-11799177.pdf?src-supplier=Rs; ComponentLink2Description: https://datasheet.ciiva.com/11799/0900766b81275e31-11799177.pdf?src-supplier=Rs; ComponentLink3URL: https://datasheet.ciiva.com/29700/1845312-29700540.pdf?src-supplier=Jameco; ComponentLink3Description: https://datasheet.ciiva.com/29700/1845312-29700540.pdf?src-supplier=Jameco; ComponentLink4URL: https://datasheet.ciiva.com/16291/l0110s0100blm21p-16291622.pdf?src-supplier=Future+Electronics; ComponentLink4Description: https://datasheet.ciiva.com/16291/l0110s0100blm21p-16291622.pdf?src-supplier=Future+Electronics; ComponentLink5URL: https://datasheet.ciiva.com/8021/5160-8021589.pdf?src-supplier=Element14; ComponentLink5Description: https://datasheet.ciiva.com/8021/5160-8021589.pdf?src-supplier=Element14; ComponentLink6URL: https://datasheet.ciiva.com/8021/5160-8021591.pdf?src-supplier=Element14; ComponentLink6Description: https://datasheet.ciiva.com/8021/5160-8021591.pdf?src-supplier=Element14; ComponentLink7URL: https://datasheet.ciiva.com/6211/l0110s0100blm21p-6211741.pdf?src-supplier=Digi-Key; ComponentLink7Description: https://datasheet.ciiva.com/6211/l0110s0100blm21p-6211741.pdf?src-supplier=Digi-Key; ComponentLink8URL: https://datasheet.ciiva.com/3081/l0110s0100blm21p-3081653.pdf?src-supplier=Avnet; ComponentLink8Description: https://datasheet.ciiva.com/3081/l0110s0100blm21p-3081653.pdf?src-supplier=Avnet; ComponentLink9URL: https://datasheet.ciiva.com/41449/001171738-da-01-en-chip-drossel0805-22r0-6000ma-2-0x1-25mm-41449366.pdf?src-supplier=Conrad; ComponentLink9Description: https://datasheet.ciiva.com/41449/001171738-da-01-en-chip-drossel0805-22r0-6000ma-2-0x1-25mm-41449366.pdf?src-supplier=Conrad; LCSC Part Number: C88993; Item Type: Ferrite Bead
footprint Ind-0805 (Inductor 0805)
pins: 1, 2

## BLM21SP601SH1D
designator L?
FERRITE BEAD 600 OHM 0805 1LN; Manufacturer: Murata; Manufacturer Part Number: BLM21SP601SH1D; Supplier: Arrow Electronics; Supplier Part Number: BLM21SP601SH1D; RoHS: Yes; Category: Ferrite Beads and Chips; Stock: 60000; Pricing: 4000=0.0948 (USD); ComponentLink1URL: https://www.murata.com/en-us/api/pdfdownloadapi?cate=luNoiseSupprFilteChipFerriBead&amp;partno=BLM21SP601SH1%23&src-supplier=Digi-Key; ComponentLink1Description: https://www.murata.com/en-us/api/pdfdownloadapi?cate=luNoiseSupprFilteChipFerriBead&amp;partno=BLM21SP601SH1%23&src-supplier=Digi-Key; ComponentLink2URL: https://datasheet.octopart.com/BLM21SP601SH1D-Murata-datasheet-138707483.pdf?src-supplier=Future+Electronics; ComponentLink2Description: https://datasheet.octopart.com/BLM21SP601SH1D-Murata-datasheet-138707483.pdf?src-supplier=Future+Electronics; ComponentLink3URL: https://datasheet.octopart.com/BLM21SP601SH1D-Murata-datasheet-166171483.pdf?src-supplier=TME; ComponentLink3Description: https://datasheet.octopart.com/BLM21SP601SH1D-Murata-datasheet-166171483.pdf?src-supplier=TME
footprint Ind-0805 (Inductor 0805)
pins: 1, 2

## BLM41PG600SH1L
designator L?
FERRITE BEAD 60 OHM 1806 1LN; Manufacturer: Murata; Manufacturer Part Number: BLM41PG600SH1L; Impedance: 60R; Tolerance: 25%; Max Current Rating: 6A; Number of Lines: 1; Test Frequency: 100MHz; Shielding: Unshielded; Supplier: Rs; Supplier Part Number: 1048549; RoHS: Yes; Category: Ferrite Beads and Chips; Stock: 2410; Pricing: 10=0.2, 50=0.169, 100=0.15, 500=0.13, 2000=0.12 (GBP); Mounting Technology: Surface Mount; Case/Package: 1806; Case Code (Metric): 4516; Case Code (Imperial): 1806; Contact Plating: Tin,Matte; Min Operating Temperature: -55°C; Max Operating Temperature: 125°C; Package Quantity: 1; Packaging: Tape and Reel; Max DC Current: 6A; Termination: SMD/SMT; Series: EMIFIL®, BLM41P; Length: 4.5mm; Width: 0.063inch; Height: 0.071inch; Ratings: AEC-Q200; Reach SVHC Compliant: No; Lead Free: Lead Free; RoHS Compliant: Yes; ComponentLink1URL: https://datasheet.ciiva.com/29364/l0132s0193blm41p-29364181.pdf?src-supplier=Digi-Key; ComponentLink1Description: https://datasheet.ciiva.com/29364/l0132s0193blm41p-29364181.pdf?src-supplier=Digi-Key; ComponentLink2URL: https://datasheet.ciiva.com/3067/c31e-3067201.pdf?src-supplier=Avnet; ComponentLink2Description: https://datasheet.ciiva.com/3067/c31e-3067201.pdf?src-supplier=Avnet
footprint IND 1806
pins: 1, 2

## BSS64,215
designator Q?
TRANS NPN 80V 0.1A TO236AB; Manufacturer: Nexperia; Manufacturer Part Number: BSS64,215; Supplier: Future Electronics; Supplier Part Number: 6621338; RoHS: Yes; Category: BJTs; Stock: 3000; Pricing: 3000=0.0487, 9000=0.047, 15000=0.0462, 60000=0.044, 90000=0.0427 (USD); Packaging: 10Packaging; ComponentLink1URL: https://datasheet.octopart.com/BSS64%2C215-Nexperia-datasheet-87581098.pdf?src-supplier=TME; ComponentLink1Description: https://datasheet.octopart.com/BSS64%2C215-Nexperia-datasheet-87581098.pdf?src-supplier=TME
footprint SOT-23 (TRANS NPN 40V 0.6A SOT23)
pins: 1 B, 2 E, 3 C

## C0402C103K5RAC7411
designator C?, comment 10000pF
CAP CER 10000PF 50V X7R 0402; Manufacturer: KEMET; Manufacturer Part Number: C0402C103K5RAC7411; Dielectric Material: Ceramic; Value: 10nF; Tolerance: 10%; Item Type: Capacitor; Supplier: Mouser; Supplier Part Number: 80-C0402C103K5R7411; RoHS: Yes; Category: Ceramic Capacitors; Stock: 440672; Pricing: 1=0.1, 10=0.017, 50=0.017, 100=0.009, 1000=0.005, 10000=0.004 (USD); Mounting Technology: Surface Mount; Case/Package: 0402; Min Operating Temperature: -55°C; Max Operating Temperature: 125°C; Dielectric: X7R; Voltage Rating (DC): 50V; Construction: Flat; Length: 1mm; Height: 0.5mm; Depth: 0.5mm; Radiation Hardening: No; RoHS Compliant: Yes; ComponentLink1URL: http://capacitoredge.kemet.com/capedge2/DataSheet?pn=C0402C103K5RAC7411&src-supplier=Avnet; ComponentLink1Description: http://capacitoredge.kemet.com/capedge2/DataSheet?pn=C0402C103K5RAC7411&src-supplier=Avnet
footprint Cap-0402
pins: 1, 2

## C0402C104K4REC7867
designator C?, comment 0.1uF
Cap Cer 0402 0.1UF 16V X7R 10%; Manufacturer: KEMET; Manufacturer Part Number: C0402C104K4REC7867; Item Type: Capacitor; Supplier: Digi-Key; Supplier Part Number: 399-C0402C104K4REC7867CT-ND; RoHS: No; Category: Ceramic Capacitors; Stock: 10918; Pricing: 1=0.1, 10=0.072, 50=0.0408, 100=0.0338, 500=0.02372, 1000=0.01963, 2500=0.01827, 5000=0.01672 (USD)
footprint Cap-0402
pins: 1, 2

## C0402C221K3RACAUTO
designator C?, comment 220pF
Cap Cer 220PF 25V X7R 0402; Manufacturer: KEMET; Manufacturer Part Number: C0402C221K3RACAUTO; Supplier: Mouser; Supplier Part Number: 80-C0402C221K3RAUTO; RoHS: Yes; Category: Ceramic Capacitors; Stock: 7535; Pricing: 1=0.36, 10=0.251, 50=0.251, 100=0.15, 1000=0.095, 10000=0.077 (USD); RoHS Compliant: Yes
footprint Cap-0402
pins: 1, 2

## C0402S102K5RAC7867
designator C?, comment 1000pF
CAP CER 1000PF 50V X7R 0402; Manufacturer: KEMET; Manufacturer Part Number: C0402S102K5RAC7867; Item Type: Capacitor; Supplier: Mouser; Supplier Part Number: 80-C0402S102K5R7867; RoHS: Yes; Stock: 17394; Pricing: 1=0.43, 10=0.208, 50=0.208, 100=0.156, 1000=0.113, 10000=0.092 (USD); RoHS Compliant: Yes; ComponentLink1URL: https://api.kemet.com/component-edge/download/datasheet/C0402S102K5RAC7867.pdf?src-supplier=Digi-Key; ComponentLink1Description: https://api.kemet.com/component-edge/download/datasheet/C0402S102K5RAC7867.pdf?src-supplier=Digi-Key
footprint Cap-0402
pins: 1, 2

## C0603C330J5GACTU
designator C?, comment 33pF
Multilayer Ceramic Capacitor, 33 pF, 50 V, ± 5%, C0G (NP0), 0603 [1608 Metric]; Manufacturer: KEMET; Manufacturer Part Number: C0603C330J5GACTU; Material: 4241ConductorMaterial; Voltage Rating (DC): 50V; Temperature Coefficient: 30ppm/°C; Dissipation Factor: 0.1%; Supplier: Mouser; Supplier Part Number: 80-C0603C330J5G; RoHS: Yes; Category: Ceramic Capacitors; Stock: 156407; Pricing: 1=0.14, 10=0.055, 50=0.055, 100=0.032, 1000=0.027, 10000=0.019 (USD); Mounting Technology: Surface Mount,PCB; Case/Package: 0603; Pins: 2; Case Code (Metric): 1608; Case Code (Imperial): 0603; Min Operating Temperature: -55°C; Max Operating Temperature: 125°C; Value: 33pF; Tolerance: 5%; Packaging: Tape and Reel; Dielectric: C0G; Package Quantity: 4000; Voltage Rating: 50V; Termination: SMD/SMT; Voltage: 50V; Series: SMD Comm C0G; Construction: Flat; Length: 1.6mm; Width: 0.8mm; Height: 0.8mm; Lead Pitch: 0.7mm; Depth: 0.8mm; Radiation Hardening: No; Reach SVHC Compliant: No; Lead Free: 5697LeadFree; RoHS Compliant: Yes; ComponentLink1URL: https://datasheet.ciiva.com/6177/1732690-6177173.pdf?src-supplier=Farnell; ComponentLink1Description: https://datasheet.ciiva.com/6177/1732690-6177173.pdf?src-supplier=Farnell; ComponentLink2URL: https://datasheet.ciiva.com/7823/1732690-7823738.pdf?src-supplier=Element14; ComponentLink2Description: https://datasheet.ciiva.com/7823/1732690-7823738.pdf?src-supplier=Element14; ComponentLink3URL: https://datasheet.ciiva.com/7824/kem-c1003-c0g-smd-7824030.pdf?src-supplier=Element14; ComponentLink3Description: https://datasheet.ciiva.com/7824/kem-c1003-c0g-smd-7824030.pdf?src-supplier=Element14; ComponentLink4URL: https://datasheet.ciiva.com/28668/1789732-28668661.pdf?src-supplier=Element14; ComponentLink4Description: https://datasheet.ciiva.com/28668/1789732-28668661.pdf?src-supplier=Element14; Item Type: Capacitor
footprint Cap-0603
pins: 1, 2

## C0805C470K5RACAUTO
designator C?, comment 47pF
Cap Cer 47PF 50V X7R 0805; Manufacturer: KEMET; Manufacturer Part Number: C0805C470K5RACAUTO; Supplier: Mouser; Supplier Part Number: 80-C0805C470K5RAUTO; RoHS: Yes; Category: Ceramic Capacitors; Stock: 12731; Pricing: 1=0.23, 10=0.094, 50=0.094, 100=0.055, 1000=0.048, 10000=0.037 (USD); ComponentLink1URL: https://datasheet.octopart.com/C0805C470K5RACAUTO-KEMET-datasheet-158277466.pdf?src-supplier=Element14; ComponentLink1Description: https://datasheet.octopart.com/C0805C470K5RACAUTO-KEMET-datasheet-158277466.pdf?src-supplier=Element14
footprint Cap-0805 (SMD 0805)
pins: 1, 2

## C1206C102KGRACAUTO
designator C?, comment 1000pF
CAP CER 1000PF 2KV X7R 1206; Manufacturer: KEMET; Manufacturer Part Number: C1206C102KGRACAUTO; Dielectric Material: Ceramic; Tolerance: 10%; Value: 1nF; Supplier: Mouser; Supplier Part Number: 80-C1206C102KGRAUTO; RoHS: No; Category: Ceramic Capacitors; Stock: 90441; Pricing: 1=0.26, 10=0.119, 50=0.119, 100=0.072, 1000=0.063, 10000=0.052 (USD); Mounting Technology: Surface Mount; Case/Package: 1206; Case Code (Metric): 3216; Case Code (Imperial): 1206; Contact Plating: Tin,Matte; Min Operating Temperature: -55°C; Max Operating Temperature: 125°C; Voltage Rating: 2kV; Packaging: Cut Tape; Dielectric: X7R; Termination: SMD/SMT; Voltage Rating (DC): 2kV; Series: SMD Auto X7R HV; Construction: Flat; Length: 3.2mm; Ratings: AEC-Q200; Reach SVHC Compliant: No; RoHS Compliant: No; ComponentLink1URL: http://www.farnell.com/datasheets/2741171.pdf?src-supplier=Farnell; ComponentLink1Description: http://www.farnell.com/datasheets/2741171.pdf?src-supplier=Farnell; ComponentLink2URL: http://www.mouser.com/ds/2/212/KEM_C1010_X7R_HV_SMD-1102742.pdf?src-supplier=Mouser; ComponentLink2Description: http://www.mouser.com/ds/2/212/KEM_C1010_X7R_HV_SMD-1102742.pdf?src-supplier=Mouser; ComponentLink3URL: http://capacitoredge.kemet.com/capedge2/DataSheet/Datasheet-C1206C102KGRACAUTO.pdf?pn=C1206C102KGRACAUTO&src-supplier=Avnet; ComponentLink3Description: http://capacitoredge.kemet.com/capedge2/DataSheet/Datasheet-C1206C102KGRACAUTO.pdf?pn=C1206C102KGRACAUTO&src-supplier=Avnet; ComponentLink4URL: http://www.farnell.com/datasheets/2741171.pdf?src-supplier=Newark; ComponentLink4Description: http://www.farnell.com/datasheets/2741171.pdf?src-supplier=Newark; ComponentLink5URL: https://datasheet.octopart.com/C1206C102KGRACAUTO-Kemet-datasheet-41767101.pdf?src-supplier=Newark; ComponentLink5Description: https://datasheet.octopart.com/C1206C102KGRACAUTO-Kemet-datasheet-41767101.pdf?src-supplier=Newark; ComponentLink6URL: https://api.kemet.com/component-edge/download/datasheet/C1206C102KGRACAUTO.pdf?src-supplier=Digi-Key; ComponentLink6Description: https://api.kemet.com/component-edge/download/datasheet/C1206C102KGRACAUTO.pdf?src-supplier=Digi-Key; ComponentLink7URL: https://datasheet.octopart.com/C1206C102KGRACAUTO-KEMET-datasheet-149525142.pdf?src-supplier=Farnell; ComponentLink7Description: https://datasheet.octopart.com/C1206C102KGRACAUTO-KEMET-datasheet-149525142.pdf?src-supplier=Farnell; ComponentLink8URL: http://www.farnell.com/datasheets/2741171.pdf?src-supplier=Element14; ComponentLink8Description: http://www.farnell.com/datasheets/2741171.pdf?src-supplier=Element14; ComponentLink9URL: https://datasheet.octopart.com/C1206C102KGRACAUTO-Kemet-datasheet-66532414.pdf?src-supplier=Element14; ComponentLink9Description: https://datasheet.octopart.com/C1206C102KGRACAUTO-Kemet-datasheet-66532414.pdf?src-supplier=Element14; ComponentLink10URL: https://datasheet.octopart.com/C1206C102KGRACAUTO-KEMET-datasheet-140424778.pdf?src-supplier=TME; ComponentLink10Description: https://datasheet.octopart.com/C1206C102KGRACAUTO-KEMET-datasheet-140424778.pdf?src-supplier=TME; ComponentLink11URL: https://datasheet.octopart.com/C1206C102KGRACAUTO-KEMET-datasheet-147336163.pdf?src-supplier=LKR; ComponentLink11Description: https://datasheet.octopart.com/C1206C102KGRACAUTO-KEMET-datasheet-147336163.pdf?src-supplier=LKR
footprint Cap-1206 (SMD 1206)
pins: 1, 2